# Altium footprint library SamacSys.PcbLib: 1008 footprints (part 26 of 63)
Each footprint in its own frame and in the unit in brackets; x right, y up, seen from the top. Pads: shape width x height; smd on the part's side, far side on the other; paste and mask are expansions set on the pad; w line width, h text height; cw(c..) or ccw(c..) is an arc to the next point about the centre after c.
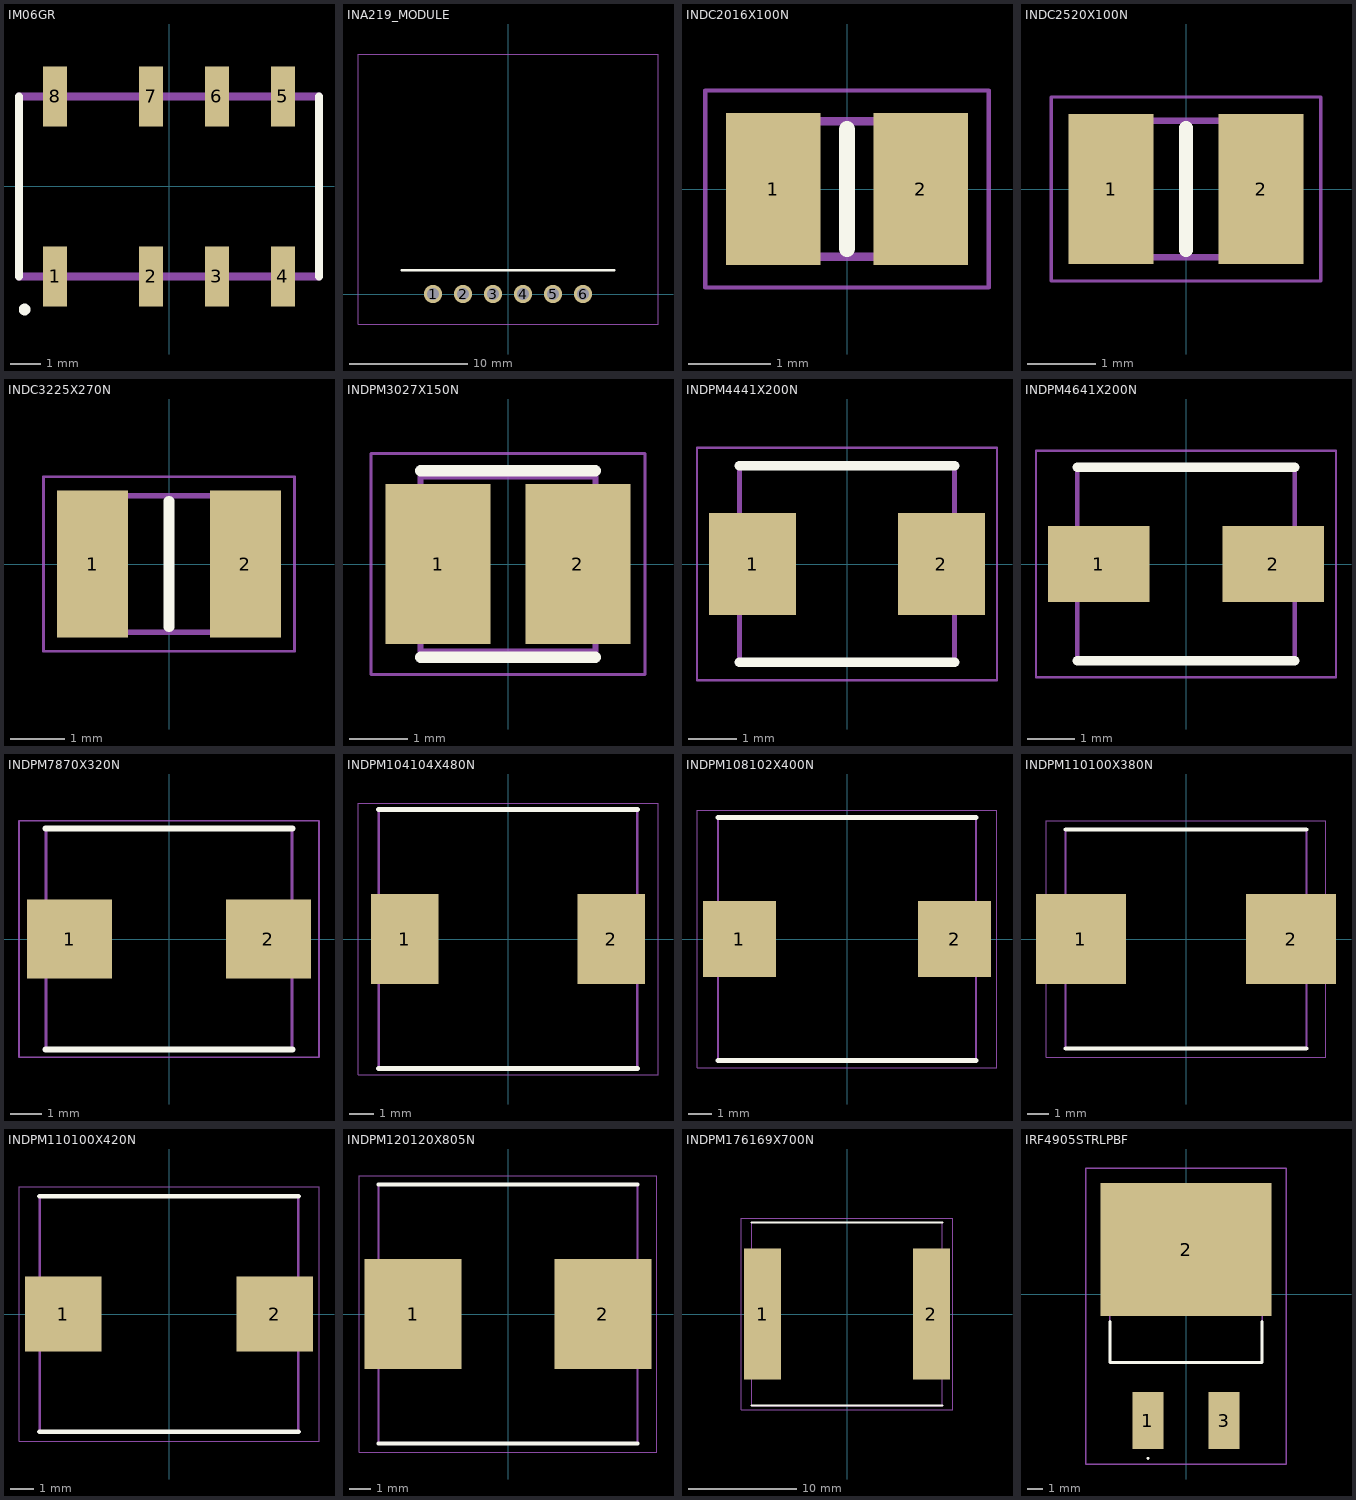
[diagram p25: the footprints below, top view; thin cyan lines are the x and y axes]

## IM06GR [mm]
pads (8):
  rect 0.8x2 smd: 1(-3.8,-3) 2(-0.6,-3) 3(1.6,-3) 4(3.8,-3) 5(3.8,3) 6(1.6,3) 7(-0.6,3) 8(-3.8,3)
Top Overlay:
  circle w0.254: c-4.814,-4.101 r0.067
  lines w0.254: -5,-3 -5,3 ; 5,-3 5,3
Assembly:
  lines w0.254: -5,-3 -5,3 5,3 5,-3 -5,-3
3D body "IM03GR.stp": height 5.65, standoff 0, extent -5,-3.86 5,3.64

## INA219_MODULE [mm]
pads (6):
  round 1.55 hole 1.05: 1(-6.35,0) 2(-3.81,0) 3(-1.27,0) 4(1.27,0) 5(3.81,0) 6(6.35,0)
Top Overlay:
  lines w0.2: -9,2 9,2
Top Courtyard:
  lines w0.1: -12.7,-2.54 -10.16,-2.54 12.7,-2.54 12.7,20.32 -12.7,20.32 -12.7,-2.54

## INDC2016X100N [mm]
pads (2):
  rect 1.15x1.85 smd: 1(-0.9,0) 2(0.9,0)
Top Overlay:
  lines w0.2: 0,-0.725 0,0.725
Assembly:
  lines w0.1: -1.025,-0.825 -1.025,0.825 1.025,0.825 1.025,-0.825 -1.025,-0.825
Countryard:
  lines w0.05: -1.725,-1.2 -1.725,1.2 1.725,1.2 1.725,-1.2 -1.725,-1.2
3D body "SRN2010TA-4R7M.stp": height 1, standoff 0, extent -1.025,-0.825 1.025,0.825

## INDC2520X100N [mm]
pads (2):
  rect 1.25x2.2 smd: 1(-1.1,0) 2(1.1,0)
Top Overlay:
  lines w0.2: 0,-0.9 0,0.9
Assembly:
  lines w0.1: -1.25,-1 -1.25,1 1.25,1 1.25,-1 -1.25,-1
Countryard:
  lines w0.05: -1.975,-1.35 -1.975,1.35 1.975,1.35 1.975,-1.35 -1.975,-1.35
3D body "LQM2HPN2R2MG0L.stp": height 1, standoff 0, extent -1.25,-1 1.25,1

## INDC3225X270N [mm]
pads (2):
  rect 1.3x2.7 smd: 1(-1.4,0) 2(1.4,0)
Top Overlay:
  lines w0.2: 0,-1.15 0,1.15
Assembly:
  lines w0.1: -1.6,-1.25 -1.6,1.25 1.6,1.25 1.6,-1.25 -1.6,-1.25
Countryard:
  lines w0.05: -2.3,-1.6 -2.3,1.6 2.3,1.6 2.3,-1.6 -2.3,-1.6
3D body "L1210R2R2MDWIT.stp": height 2.7, standoff 0, extent -1.7,-1.35 1.7,1.35

## INDPM3027X150N [mm]
pads (2):
  rect 1.8x2.75 smd: 1(-1.2,0) 2(1.2,0)
Top Overlay:
  lines w0.2: -1.5,-1.6 1.5,-1.6 ; -1.5,1.6 1.5,1.6
Assembly:
  lines w0.1: -1.5,-1.5 1.5,-1.5 1.5,1.5 -1.5,1.5 -1.5,-1.5
Countryard:
  lines w0.05: -2.35,-1.9 2.35,-1.9 2.35,1.9 -2.35,1.9 -2.35,-1.9
3D body "NR3015.step": height 1.5, standoff 0, extent -1.5,-1.5 1.5,1.5

## INDPM4441X200N [mm]
pads (2):
  rect 1.8x2.1 smd: 1(-1.95,0) 2(1.95,0)
Top Overlay:
  lines w0.2: -2.225,-2.03 2.225,-2.03 ; -2.225,2.03 2.225,2.03
Assembly:
  lines w0.1: -2.225,-2.03 -2.225,2.03 2.225,2.03 2.225,-2.03 -2.225,-2.03
Countryard:
  lines w0.05: -3.1,-2.405 -3.1,2.405 3.1,2.405 3.1,-2.405 -3.1,-2.405
3D body "SRP4020TA-100M.stp": height 2, standoff 0, extent -2.225,-2.03 2.225,2.03

## INDPM4641X200N [mm]
pads (2):
  rect 2.15x1.6 smd: 1(-1.85,0) 2(1.85,0)
Top Overlay:
  lines w0.2: -2.3,-2.05 2.3,-2.05 ; -2.3,2.05 2.3,2.05
Assembly:
  lines w0.1: -2.3,-2.05 2.3,-2.05 2.3,2.05 -2.3,2.05 -2.3,-2.05
Countryard:
  lines w0.05: -3.175,-2.4 3.175,-2.4 3.175,2.4 -3.175,2.4 -3.175,-2.4
3D body "BMRA00040420100MA1.stp": height 2, standoff 0, extent -2.3,-2.05 2.3,2.05

## INDPM7870X320N [mm]
pads (2):
  rect 2.7x2.5 smd: 1(-3.15,0) 2(3.15,0)
Top Overlay:
  lines w0.2: -3.9,-3.5 3.9,-3.5 ; -3.9,3.5 3.9,3.5
Assembly:
  lines w0.1: -3.9,-3.5 -3.9,3.5 3.9,3.5 3.9,-3.5 -3.9,-3.5
Countryard:
  lines w0.05: -4.75,-3.75 -4.75,3.75 4.75,3.75 4.75,-3.75 -4.75,-3.75
3D body "SRP7030-2R2M.stp": height 3.2, standoff 0, extent -3.9,-3.5 3.9,3.5

## INDPM104104X480N [mm] "TDK B82464G"
height 5
pads (2):
  rect 2.7x3.6 smd: 1(-4.15,0) 2(4.15,0)
Top Overlay:
  lines w0.2: -5.2,-5.2 5.2,-5.2 ; -5.2,5.2 5.2,5.2
Assembly:
  lines w0.1: -5.2,-5.2 -5.2,5.2 5.2,5.2 5.2,-5.2 -5.2,-5.2
Countryard:
  lines w0.05: -6.025,-5.45 -6.025,5.45 6.025,5.45 6.025,-5.45 -6.025,-5.45
3D body "B82464G4153M.stp": height 4.65, standoff -0.05, extent -5,-5 5,5

## INDPM108102X400N [mm]
pads (2):
  rect 3.05x3.2 smd: 1(-4.5,0) 2(4.5,0)
Top Overlay:
  lines w0.2: -5.398,-5.08 5.398,-5.08 ; -5.398,5.08 5.398,5.08
Assembly:
  lines w0.1: -5.398,-5.08 5.398,-5.08 5.398,5.08 -5.398,5.08 -5.398,-5.08
Countryard:
  lines w0.05: -6.275,-5.394 6.275,-5.394 6.275,5.394 -6.275,5.394 -6.275,-5.394
3D body "IHLP4040DZER220M11.stp": height 3.88, standoff 0, extent -5.312,-5.111 5.31,5.105

## INDPM110100X380N [mm] "APH1040"
pads (2):
  rect 4.1x4.1 smd: 1(-4.8,0) 2(4.8,0)
Top Overlay:
  lines w0.2: -5.5,-5 5.5,-5 ; -5.5,5 5.5,5
Assembly:
  lines w0.1: -5.5,-5 5.5,-5 5.5,5 -5.5,5 -5.5,-5
Countryard:
  lines w0.05: -6.375,-5.4 6.375,-5.4 6.375,5.4 -6.375,5.4 -6.375,-5.4
3D body "SRP1038C-330M.stp": height 4.2, standoff 0, extent -5.5,-5 5.5,5

## INDPM110100X420N [mm]
pads (2):
  rect 3.25x3.2 smd: 1(-4.5,0) 2(4.5,0)
Top Overlay:
  lines w0.2: -5.5,-5 5.5,-5 ; -5.5,5 5.5,5
Assembly:
  lines w0.1: -5.5,-5 5.5,-5 5.5,5 -5.5,5 -5.5,-5
Countryard:
  lines w0.05: -6.375,-5.4 6.375,-5.4 6.375,5.4 -6.375,5.4 -6.375,-5.4
3D body "SRP1038C-330M.stp": height 4.2, standoff 0, extent -5.5,-5 5.5,5

## INDPM120120X805N [mm]
pads (2):
  rect 4.5x5.1 smd: 1(-4.4,0) 2(4.4,0)
Top Overlay:
  lines w0.2: -6,-6 6,-6 ; -6,6 6,6
Assembly:
  lines w0.1: -6,-6 -6,6 6,6 6,-6 -6,-6
Countryard:
  lines w0.05: -6.9,-6.4 -6.9,6.4 6.9,6.4 6.9,-6.4 -6.9,-6.4
3D body "MSS1278-223MLB.stp": height 8.05, standoff 0, extent -6,-6 6,6

## INDPM176169X700N [mm]
pads (2):
  rect 3.45x12.1 smd: 1(-7.8,0) 2(7.8,0)
Top Overlay:
  lines w0.2: -8.8,-8.45 8.8,-8.45 ; -8.8,8.45 8.8,8.45
Assembly:
  lines w0.1: -8.8,-8.45 -8.8,8.45 8.8,8.45 8.8,-8.45 -8.8,-8.45
Countryard:
  lines w0.05: -9.775,-8.85 -9.775,8.85 9.775,8.85 9.775,-8.85 -9.775,-8.85
3D body "SRP1770TA-1R0M.stp": height 6.81, standoff 0, extent -8.949,-8.45 8.951,8.45

## IRF4905STRLPBF [mm]
pads (3):
  rect 2.08x3.81 smd: 1(-2.54,-8.427) 3(2.54,-8.427)
  rect 11.43x8.89 smd: 2(0,3.003)
Top Overlay:
  lines w0.1: -2.54,-11 cw(c-2.54,-10.95) -2.54,-10.9 cw(c-2.54,-10.95) -2.54,-11
  lines w0.2: -5.08,-1.8 -5.08,-4.54 5.08,-4.54 5.08,-1.8
Assembly:
  lines w0.1: -5.08,-4.54 -5.08,4.54 5.08,4.54 5.08,-4.54 -5.08,-4.54
Countryard:
  lines w0.1: -6.715,-11.332 -6.715,8.448 6.715,8.448 6.715,-11.332 -6.715,-11.332
3D body "IRF4905STRLPBF.stp": height 4.7, standoff 0, extent -5.08,-9.065 5.08,6.18